# Altium footprint library pvb_tc.PcbLib: 1 footprints
Each footprint in its own frame and in the unit in brackets; x right, y up, seen from the top. Pads: shape width x height; smd on the part's side, far side on the other; paste and mask are expansions set on the pad; w line width, h text height; cw(c..) or ccw(c..) is an arc to the next point about the centre after c.
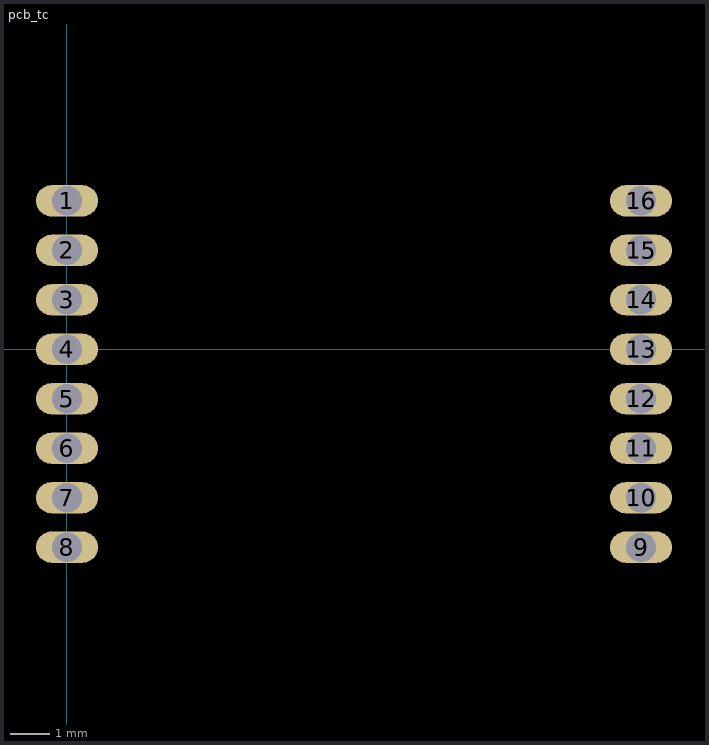
[diagram p0: the footprint, top view; thin cyan lines are the x and y axes]

## pcb_tc [mm]
pads (16):
  oval 1.6x0.8 hole 0.762: 1(0,3.81) 2(0,2.54) 3(0,1.27) 4(0,0) 5(0,-1.27) 6(0,-2.54) 7(0,-3.81) 8(0,-5.08) 9(14.732,-5.08) 10(14.732,-3.81) 11(14.732,-2.54) 12(14.732,-1.27) 13(14.732,0) 14(14.732,1.27) 15(14.732,2.54) 16(14.732,3.81)
3D body "E28.SLDPRT": height 2.8, standoff 0, extent -0.127,-7.747 14.873,18.753